# Altium footprint library UCP.PcbLib: 222 footprints (part 8 of 14)
Each footprint in its own frame and in the unit in brackets; x right, y up, seen from the top. Pads: shape width x height; smd on the part's side, far side on the other; paste and mask are expansions set on the pad; w line width, h text height; cw(c..) or ccw(c..) is an arc to the next point about the centre after c.
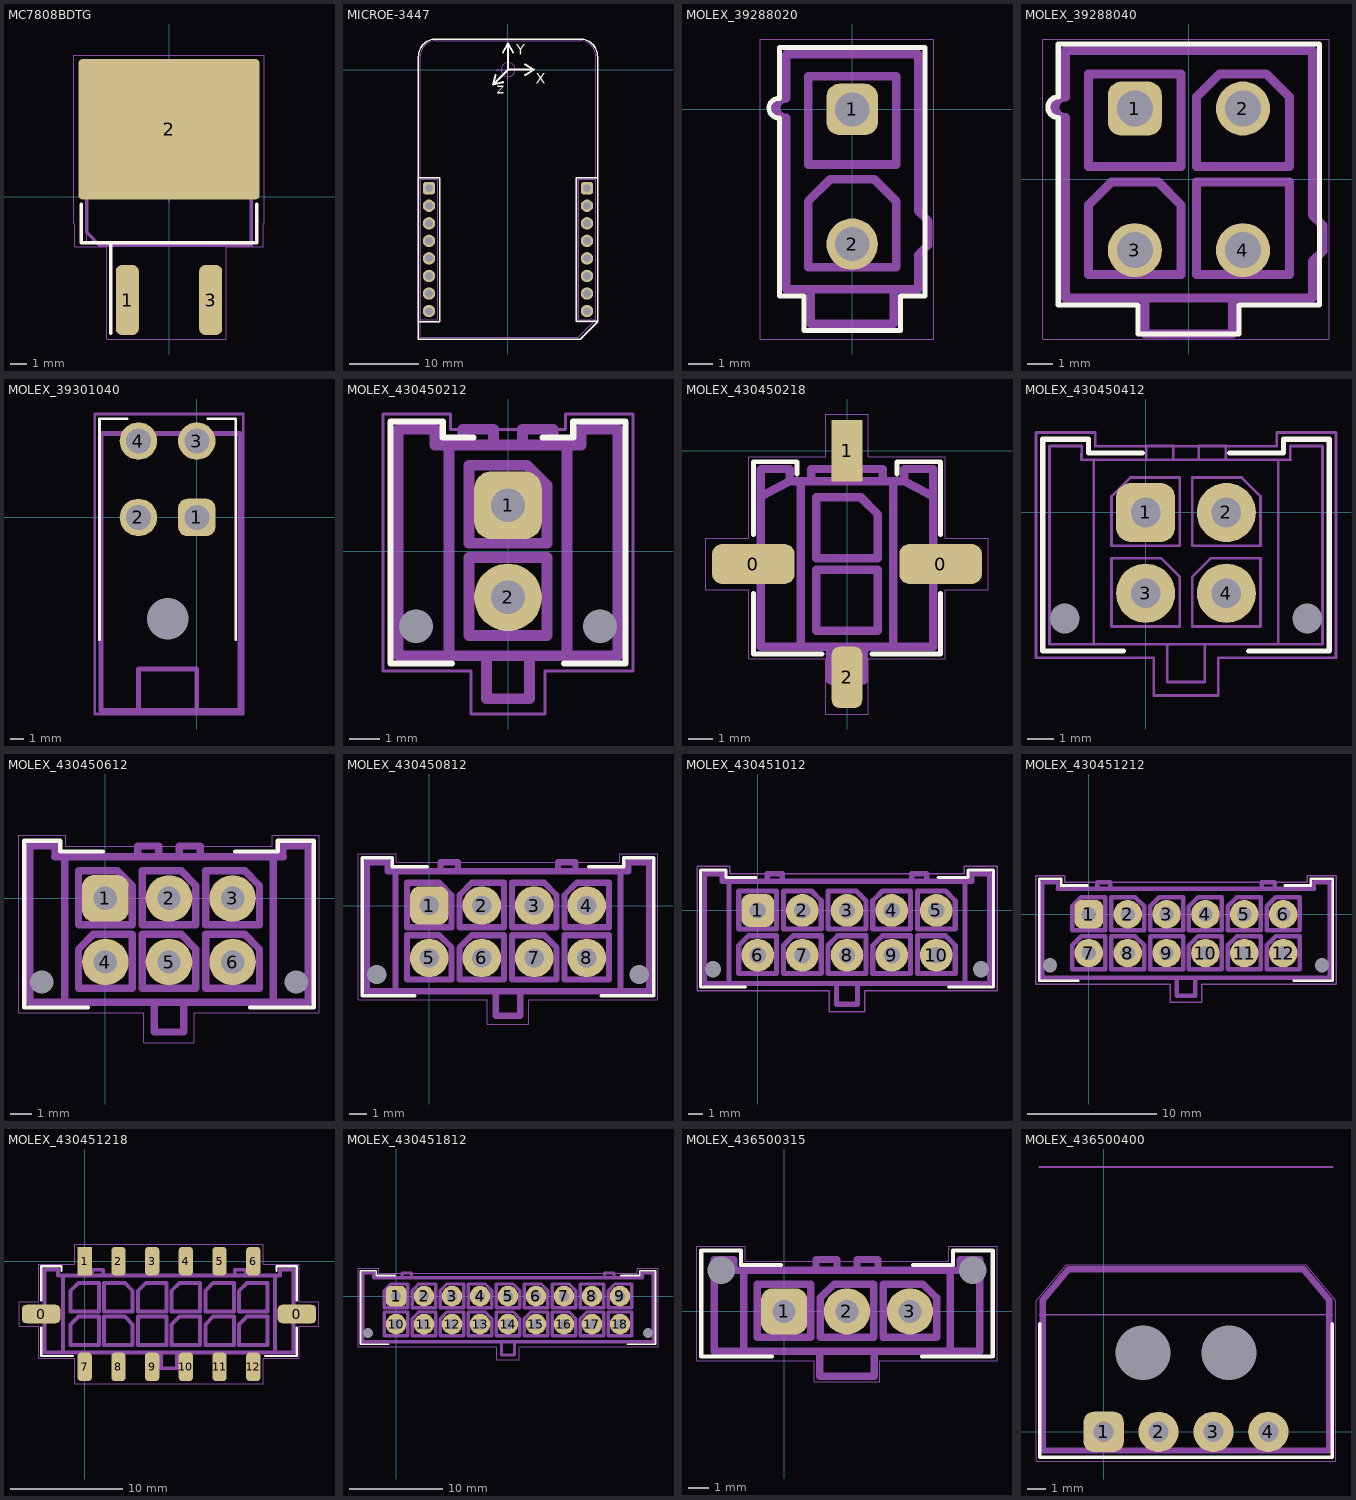
[diagram p7: the footprints below, top view; thin cyan lines are the x and y axes]

## MC7808BDTG [mm] "MC7808BDTG"
pads (3):
  rrect50% 1.4x4.25 smd: 1(-2.54,-6.3) 3(2.54,-6.3)
  rrect5% 11x8.55 smd paste-10.79: 2(0,4.1)
Top Overlay:
  lines w0.2: -5.34,-0.475 -5.34,-2.808 5.34,-2.808 5.34,-0.475 ; -3.54,-8.325 -3.54,-2.81
Top Paste:
  region: -4.11,6.537 -4.11,8.047 -5.31,8.047 -5.31,6.537
  region: -2.54,6.537 -2.54,8.047 -3.74,8.047 -3.74,6.537
  region: 3.74,6.537 3.74,8.047 2.54,8.047 2.54,6.537
  region: 5.31,6.537 5.31,8.047 4.11,8.047 4.11,6.537
  region: 0.6,6.537 0.6,8.047 -0.6,8.047 -0.6,6.537
  region: 2.17,6.537 2.17,8.047 0.97,8.047 0.97,6.537
  region: -0.97,6.537 -0.97,8.047 -2.17,8.047 -2.17,6.537
  region: -5.31,1.663 -5.31,0.153 -4.11,0.153 -4.11,1.663
  region: -3.74,1.663 -3.74,0.153 -2.54,0.153 -2.54,1.663
  region: 2.54,1.663 2.54,0.153 3.74,0.153 3.74,1.663
  region: 4.11,1.663 4.11,0.153 5.31,0.153 5.31,1.663
  region: -0.6,1.663 -0.6,0.153 0.6,0.153 0.6,1.663
  region: 0.97,1.663 0.97,0.153 2.17,0.153 2.17,1.663
  region: -2.17,1.663 -2.17,0.153 -0.97,0.153 -0.97,1.663
  region: -4.11,4.409 -4.11,5.919 -5.31,5.919 -5.31,4.409
  region: -2.54,4.409 -2.54,5.919 -3.74,5.919 -3.74,4.409
  region: 3.74,4.409 3.74,5.919 2.54,5.919 2.54,4.409
  region: 5.31,4.409 5.31,5.919 4.11,5.919 4.11,4.409
  region: 0.6,4.409 0.6,5.919 -0.6,5.919 -0.6,4.409
  region: 2.17,4.409 2.17,5.919 0.97,5.919 0.97,4.409
  region: -0.97,4.409 -0.97,5.919 -2.17,5.919 -2.17,4.409
  region: -5.31,3.791 -5.31,2.281 -4.11,2.281 -4.11,3.791
  region: -3.74,3.791 -3.74,2.281 -2.54,2.281 -2.54,3.791
  region: 2.54,3.791 2.54,2.281 3.74,2.281 3.74,3.791
  region: 4.11,3.791 4.11,2.281 5.31,2.281 5.31,3.791
  region: -0.6,3.791 -0.6,2.281 0.6,2.281 0.6,3.791
  region: 0.97,3.791 0.97,2.281 2.17,2.281 2.17,3.791
  region: -2.17,3.791 -2.17,2.281 -0.97,2.281 -0.97,3.791
Top Designator:
  text ".Designator" at 0,0 h1.5
Top Assembly:
  lines w0.2: -5.017,-2.175 -4.207,-2.985 5.017,-2.985 5.017,7.62 -5.017,7.62 -5.017,-2.175
Top Courtyard:
  lines w0.05: -0.35,0 0.35,0 ; 0,-0.35 0,0.35 ; -5.795,-1.66 -5.795,8.625 5.795,8.625 5.795,-1.66 5.74,-1.66 5.74,-3.058 3.49,-3.058 3.49,-8.675 -3.79,-8.675 -3.79,-3.058 -5.74,-3.058 -5.74,-1.66 -5.795,-1.66
Top Component Outline:
  lines w0.025: -5.017,-2.731 -5.017,6.414 5.017,6.414 5.017,-2.731 -5.017,-2.731
Top Component Terminal:
  lines w0.025: -5.335,0.027 5.335,0.027 5.335,7.65 -5.335,7.65 -5.335,0.027 ; -3.035,-7.62 -3.035,-5.16 -2.045,-5.16 -2.045,-7.62 -3.035,-7.62 ; 2.045,-7.62 2.045,-5.16 3.035,-5.16 3.035,-7.62 2.045,-7.62
3D body "TO-263.stp": height 4.84, standoff 0, extent -5.017,-7.621 5.017,7.619

## MICROE-3447 [mm]
pads (16):
  rrect50% 1.8x1.8 hole 1.1: P1.1(-11.43,-17.146) P2.1(11.43,-17.146)
  round 1.8 hole 1.1: P1.2(-11.43,-19.686) P1.3(-11.43,-22.226) P1.4(-11.43,-24.766) P1.5(-11.43,-27.306) P1.6(-11.43,-29.846) P1.7(-11.43,-32.386) P1.8(-11.43,-34.926) P2.2(11.43,-19.686) P2.3(11.43,-22.226) P2.4(11.43,-24.766) P2.5(11.43,-27.306) P2.6(11.43,-29.846) P2.7(11.43,-32.386) P2.8(11.43,-34.926)
Top Overlay:
  lines w0.2: -12.954,-36.45 -9.906,-36.45 -9.906,-15.646 -12.954,-15.646 ; -12.954,1.9 -12.954,-38.966 10.438,-38.966 12.95,-36.454 12.95,-35.884 12.95,1.904 ccw(c10.414,1.904) 10.414,4.44 -10.414,4.44 ccw(c-10.414,1.904) -12.95,1.904 ; 12.954,-36.45 12.954,-36.426 9.906,-36.426 9.906,-15.646 12.954,-15.646
  lines w0.3: -1.82,-0.759 -2.173,-2.173 ; -0.759,-1.82 -2.173,-2.173 ; -0.75,2.5 0,3.75 ; 0.75,2.5 0,3.75 ; 2.5,-0.75 3.75,0 ; 2.5,0.75 3.75,0 ; -2.173,-2.173 0,0 ; 0,0 3.75,0 ; 0,0 0,3.75
  text "Y" at 1.204,2.154 h1.52
  text "X" at 4.004,-2.044 h1.52
  text "z" at -1.646,-3.446 h1.52
Assembly Notes:
  lines w0.05: -12.954,-36.45 -12.954,-15.622 -9.906,-15.622 -9.906,-36.45 ; -12.954,-36.446 -9.93,-36.446 ; 9.906,-36.45 9.906,-15.622 12.954,-15.622 12.954,-36.45 ; 9.906,-36.446 12.93,-36.446
Top Designator:
  text ".Designator" at -4.511,-0.453 h2
Top Courtyard:
  circle w0.025: c0,0 r1
  lines w0.025: -12.68,-36.196 -12.68,-15.876 ; -1.702,0 1.702,0 ; 0,-1.702 0,1.702 ; 12.68,-36.196 12.68,-15.876 ; -12.7,-38.736 10.16,-38.736 12.7,-36.196 12.7,1.904 ccw(c10.414,1.904) 10.414,4.19 -10.414,4.19 ccw(c-10.414,1.904) -12.7,1.904 -12.7,-38.736
Bottom 3D Body:
  lines w0.1: -12.7,-36.196 -10.16,-36.196 -10.16,-15.876 -12.7,-15.876 -12.7,-36.196 ; 10.16,-36.196 12.7,-36.196 12.7,-15.876 10.16,-15.876 10.16,-36.196
Top Component Outline:
  lines w0.025: -12.68,-36.196 -10.18,-36.196 -10.18,-15.876 -12.68,-15.876 -12.68,-36.196 ; 10.18,-36.196 12.68,-36.196 12.68,-15.876 10.18,-15.876 10.18,-36.196
Top Component Terminal:
  lines w0.025: -11.75,-35.246 -11.75,-34.606 -11.11,-34.606 -11.11,-35.246 -11.75,-35.246 ; -11.75,-32.706 -11.75,-32.066 -11.11,-32.066 -11.11,-32.706 -11.75,-32.706 ; -11.75,-30.166 -11.75,-29.526 -11.11,-29.526 -11.11,-30.166 -11.75,-30.166 ; -11.75,-27.626 -11.75,-26.986 -11.11,-26.986 -11.11,-27.626 -11.75,-27.626 ; -11.75,-25.086 -11.75,-24.446 -11.11,-24.446 -11.11,-25.086 -11.75,-25.086 ; -11.75,-22.546 -11.75,-21.906 -11.11,-21.906 -11.11,-22.546 -11.75,-22.546 ; -11.75,-20.006 -11.75,-19.366 -11.11,-19.366 -11.11,-20.006 -11.75,-20.006 ; -11.75,-17.466 -11.75,-16.826 -11.11,-16.826 -11.11,-17.466 -11.75,-17.466 ; 11.11,-35.246 11.11,-34.606 11.75,-34.606 11.75,-35.246 11.11,-35.246 ; 11.11,-32.706 11.11,-32.066 11.75,-32.066 11.75,-32.706 11.11,-32.706 ; 11.11,-30.166 11.11,-29.526 11.75,-29.526 11.75,-30.166 11.11,-30.166 ; 11.11,-27.626 11.11,-26.986 11.75,-26.986 11.75,-27.626 11.11,-27.626 ; 11.11,-25.086 11.11,-24.446 11.75,-24.446 11.75,-25.086 11.11,-25.086 ; 11.11,-22.546 11.11,-21.906 11.75,-21.906 11.75,-22.546 11.11,-22.546 ; 11.11,-20.006 11.11,-19.366 11.75,-19.366 11.75,-20.006 11.11,-20.006 ; 11.11,-17.466 11.11,-16.826 11.75,-16.826 11.75,-17.466 11.11,-17.466
3D body "MICROE-3447.stp": height 14, standoff -3, extent -12.7,-38.736 12.7,4.19

## MOLEX_39288020 [mm] "Header, Vertical Receptacle, 4.20 mm row X 5.50 mm column pitch; 1.19 mm lead width, 2 pins, 2 rows, 1 pin per row, 5.40 mm L X 9.60 mm W X 13.05 mm H body"
height 12.8
pads (2):
  rrect50% 2.1x2.1 hole 1.4: 1(0,0)
  round 2.1 hole 1.4: 2(0,-5.5)
Top Overlay:
  lines w0.2: -2.975,-7.625 -2.975,-0.35 cw(c-3,0.05) -2.975,0.45 -2.975,2.525 2.975,2.525 2.975,-7.625 1.975,-7.625 1.975,-9.025 -1.975,-9.025 -1.975,-7.625 -2.975,-7.625
Top Assembly:
  lines w0.35: -1.7,-7.35 -1.7,-8.75 1.7,-8.75 1.7,-7.35 ; -1.7,-7.35 -2.7,-7.35 -2.7,-0.35 cw(c-2.7,0.05) -2.7,0.45 -2.7,2.25 2.7,2.25 2.7,-4.14 3.1,-4.54 3.1,-5.54 2.7,-5.94 2.7,-7.35 1.7,-7.35 ; -1.7,-7.35 1.7,-7.35 ; -1.8,-6.45 -1.8,-3.75 -0.9,-2.85 0.9,-2.85 1.8,-3.75 1.8,-6.45 -1.8,-6.45 ; -1.8,-2.25 1.8,-2.25 1.8,1.35 -1.8,1.35 -1.8,-2.25
Top Courtyard:
  lines w0.05: -3.751,-9.375 -3.751,2.875 3.325,2.875 3.325,-9.375 -3.751,-9.375
Top Component Outline:
  lines w0.05: -2.7,-7.35 -2.7,-0.35 cw(c-2.7,0.05) -2.7,0.45 -2.7,2.25 2.7,2.25 2.7,-4.14 3.1,-4.54 3.1,-5.54 2.7,-5.94 2.7,-7.35 1.7,-7.35 -1.7,-7.35 -2.7,-7.35
Top Component Terminal:
  lines w0.025: -0.57,-5.8 0.57,-5.8 0.57,-5.2 -0.57,-5.2 -0.57,-5.8 ; -0.57,-0.3 0.57,-0.3 0.57,0.3 -0.57,0.3 -0.57,-0.3
3D body "MOLEX_39288020.stp": height 12.8, standoff -3.5, extent -3.1,-8.75 3.1,2.25

## MOLEX_39288040 [mm] "Header, Vertical Receptacle, 4.20 mm row X 5.50 mm column pitch; 1.19 mm lead width, 4 pins, 2 rows, 2 pins per row, 9.80 mm L X 9.60 mm W X 13.05 mm H body"
height 13.1
pads (4):
  rrect50% 2.1x2.1 hole 1.4: 1(-2.1,2.75)
  round 2.1 hole 1.4: 2(2.1,2.75) 3(-2.1,-2.75) 4(2.1,-2.75)
Top Overlay:
  lines w0.2: -5.075,2.398 cw(c-5.075,2.799) -5.075,3.2 -5.075,5.25 5.075,5.25 5.075,-4.875 1.95,-4.875 1.95,-6 -1.975,-6 -1.975,-4.875 -5.075,-4.875 -5.075,2.4
Top Assembly:
  lines w0.35: -1.7,-4.6 -4.8,-4.6 -4.8,2.4 cw(c-4.8,2.8) -4.8,3.2 -4.8,5 4.8,5 4.8,-1.39 5.2,-1.79 5.2,-2.79 4.8,-3.19 4.8,-4.6 1.7,-4.6 ; -1.7,-4.6 -1.7,-6 1.7,-6 1.7,-4.6 ; -1.7,-4.6 1.7,-4.6 ; -3.9,-3.7 -3.9,-1 -3,-0.1 -1.2,-0.1 -0.3,-1 -0.3,-3.7 -3.9,-3.7 ; -3.9,0.5 -3.9,4.1 -0.3,4.1 -0.3,0.5 -3.9,0.5 ; 0.3,-3.7 3.9,-3.7 3.9,-0.1 0.3,-0.1 0.3,-3.7 ; 0.3,0.5 3.9,0.5 3.9,3.2 3,4.1 1.2,4.1 0.3,3.2 0.3,0.5
Top Courtyard:
  lines w0.025: -5.675,-6.2 5.45,-6.2 5.45,5.45 -5.675,5.45 -5.675,-6.2
Top Component Outline:
  lines w0.025: -4.8,-4.6 4.8,-4.6 4.8,-3.19 5.2,-2.79 5.2,-1.79 4.8,-1.39 4.8,5 -4.8,5 -4.8,3.2 ccw(c-4.8,2.8) -4.8,2.4 -4.8,-4.6
Top Component Terminal:
  lines w0.025: -2.67,-3.05 -1.53,-3.05 -1.53,-2.45 -2.67,-2.45 -2.67,-3.05 ; -2.67,2.45 -1.53,2.45 -1.53,3.05 -2.67,3.05 -2.67,2.45 ; 1.53,-3.05 2.67,-3.05 2.67,-2.45 1.53,-2.45 1.53,-3.05 ; 1.53,2.45 2.67,2.45 2.67,3.05 1.53,3.05 1.53,2.45
3D body "MOLEX_39281040.stp": height 12.8, standoff -3.5, extent -5.2,-6 5.2,5

## MOLEX_39301040 [mm]
pads (5):
  rrect50% 2.7x2.7 hole 1.8: 1(0,0)
  round 2.7 hole 1.8: 2(-4.2,0) 3(0,5.5) 4(-4.2,5.5)
  round 0 hole 3 unplated mask+0.25: MT1(-2.1,-7.3)
Top Overlay:
  lines w0.2: -7,-8.8 -7,7.1 -5,7.1 ; 0.8,7.1 2.8,7.1 2.8,-8.8
Top Assembly:
  lines w0.35: -4.2,-13.9 -4.2,-10.9 0,-10.9 0,-13.9 ; -6.9,-13.9 -6.9,6.035 3.1,6.035 3.1,-13.9 -6.9,-13.9
Top Courtyard:
  lines w0.2: -7.35,-14.15 3.35,-14.15 3.35,7.45 -7.35,7.45 -7.35,-14.15
Top Component Outline:
  lines w0.025: -6.9,-13.889 3.1,-13.9 3.1,6.035 -6.9,6.035 -6.9,-13.889
Top Component Terminal:
  lines w0.025: -4.735,-0.535 -3.665,-0.535 -3.665,0.535 -4.735,0.535 -4.735,-0.535 ; -4.735,4.965 -3.665,4.965 -3.665,6.035 -4.735,6.035 -4.735,4.965 ; -0.535,-0.535 0.535,-0.535 0.535,0.535 -0.535,0.535 -0.535,-0.535 ; -0.535,4.965 0.535,4.965 0.535,6.035 -0.535,6.035 -0.535,4.965
3D body "MOLEX_039301040.stp": height 11.4, standoff -3.6, extent -6.9,-13.9 3.1,6.035

## MOLEX_430450212 [mm]
height 9.91
pads (4):
  round 0 hole 1.1 unplated mask+0.1: 0(-3,-2.44) 0(3,-2.44)
  rrect50% 2.2x2.2 hole 1.1: 1(0,1.5)
  round 2.2 hole 1.1: 2(0,-1.5)
Top Overlay:
  lines w0.2: -1.825,-3.65 -3.825,-3.65 -3.825,4.22 -2.125,4.22 -2.125,3.71 -1.125,3.71 ; 1.125,3.71 2.125,3.71 2.125,4.22 3.825,4.22 3.825,-3.65 1.825,-3.65
Top Assembly:
  lines w0.35: -2.384,3.46 -1.925,3.46 ; -2.375,3.46 -2.375,3.97 -3.575,3.97 -3.575,2.979 -3.575,1.13 -3.575,0.605 -3.575,-0.545 -3.575,-1.07 -3.575,-3.4 -3.325,-3.4 -1.925,-3.4 ; -1.475,3.46 -1.475,3.97 -0.475,3.97 -0.475,3.46 ; -0.7,-3.4 -0.7,-4.8 0.7,-4.8 0.7,-3.4 ; 0.475,3.46 0.475,3.97 1.475,3.97 1.475,3.46 ; 2.375,3.46 2.375,3.97 3.575,3.97 3.575,2.979 3.575,1.13 3.575,0.605 3.575,-0.545 3.575,-1.07 3.575,-3.4 3.325,-3.4 1.925,-3.4 ; 2.384,3.46 1.925,3.46 ; -1.925,-3.4 1.925,-3.4 ; -1.925,-3.4 -1.925,-2.62 -1.925,2.48 -1.925,3.46 ; -1.925,3.46 1.925,3.46 ; 1.925,-3.4 1.925,-2.62 1.925,2.48 1.925,3.46 ; -1.27,-2.74 1.27,-2.74 1.27,-0.2 -1.27,-0.2 -1.27,-2.74 ; -1.27,0.26 1.27,0.26 1.27,2.15 0.62,2.8 -1.27,2.8 -1.27,0.26
Top Courtyard:
  lines w0.1: -4.075,-3.9 -4.075,4.47 -1.875,4.47 -1.875,3.96 1.875,3.96 1.875,4.47 4.075,4.47 4.075,-3.9 1.2,-3.9 1.2,-5.3 -1.2,-5.3 -1.2,-3.9 -4.075,-3.9
Top Component Outline:
  lines w0.05: -3.575,-3.4 -3.575,3.97 -2.375,3.97 -2.384,3.46 -1.475,3.46 -1.475,3.97 -0.475,3.97 -0.475,3.46 0.475,3.46 0.475,3.97 1.475,3.97 1.475,3.46 2.375,3.46 2.375,3.97 3.575,3.97 3.575,-3.4 0.7,-3.4 0.7,-4.8 -0.7,-4.8 -0.7,-3.4 -3.575,-3.4
Top Component Terminal:
  lines w0.025: -0.32,-1.82 0.32,-1.82 0.32,-1.18 -0.32,-1.18 -0.32,-1.82 ; -0.32,1.18 0.32,1.18 0.32,1.82 -0.32,1.82 -0.32,1.18
3D body "MOLEX_430450212.stp": height 9.91, standoff -3.18, extent -3.575,-4.8 3.575,3.97

## MOLEX_430450218 [mm]
height 9.91
pads (4):
  rrect50% 3.43x1.65 smd: 0(-3.885,-4.7) 0(3.885,-4.7)
  rect 1.27x2.54 smd: 1(0,0)
  rrect50% 1.27x2.54 smd: 2(0,-9.4)
Top Overlay:
  lines w0.2: -3.875,-5.925 -3.875,-8.43 -1.035,-8.43 ; -3.875,-3.475 -3.875,-0.46 -2.075,-0.46 -2.075,-0.97 ; 1.035,-8.43 3.875,-8.43 3.875,-5.925 ; 2.075,-0.97 2.075,-0.46 3.875,-0.46 3.875,-3.475
Top Assembly:
  lines w0.1: -3.575,-5.335 -5.325,-5.335 -5.325,-4.065 -3.575,-4.065 ; -0.32,-9.53 -0.32,-9.97 -0.32,-10.29 0.32,-10.29 0.32,-9.97 0.32,-9.53 ; -0.32,-1.27 -0.32,-0.47 -0.32,0.59 -0.32,0.91 0.32,0.91 0.32,0.59 0.32,-0.47 0.32,-1.27 ; 3.575,-5.335 5.325,-5.335 5.325,-4.065 3.575,-4.065
  lines w0.35: -1.475,-1.27 -1.475,-0.76 -0.475,-0.76 -0.475,-1.27 ; -0.7,-8.13 -0.7,-9.53 0.7,-9.53 0.7,-8.13 ; 0.475,-1.27 0.475,-0.76 1.475,-0.76 1.475,-1.27 ; -3.575,-1.902 -3.575,-0.76 -2.375,-0.76 -2.375,-1.27 ; -3.575,-1.902 -3.325,-1.77 -2.375,-1.27 ; -3.575,-1.902 -3.575,-3.6 -3.575,-4.125 -3.575,-5.275 -3.575,-5.8 -3.575,-8.13 -3.325,-8.13 -1.925,-8.13 ; -2.375,-1.27 -1.925,-1.27 ; -1.925,-8.13 -1.925,-7.38 -1.925,-2.29 -1.925,-1.27 ; -1.925,-8.13 1.925,-8.13 ; -1.925,-1.27 1.925,-1.27 ; 1.925,-8.13 1.925,-7.38 1.925,-2.29 1.925,-1.27 ; 1.925,-8.13 3.325,-8.13 3.575,-8.13 3.575,-5.8 3.575,-5.275 3.575,-4.125 3.575,-3.6 3.575,-1.902 ; 1.925,-1.27 2.375,-1.27 ; 2.375,-1.27 2.375,-0.76 3.575,-0.76 3.575,-1.902 ; 2.375,-1.27 3.325,-1.77 3.575,-1.902 ; -1.27,-7.47 1.27,-7.47 1.27,-4.93 -1.27,-4.93 -1.27,-7.47 ; -1.27,-4.47 -1.27,-1.93 0.57,-1.93 1.27,-2.63 1.27,-4.47 -1.27,-4.47
Top Courtyard:
  lines w0.05: -5.85,-5.775 -5.85,-3.625 -4.075,-3.625 -4.075,-0.26 -0.885,-0.26 -0.885,1.52 0.885,1.52 0.885,-0.26 4.075,-0.26 4.075,-3.625 5.85,-3.625 5.85,-5.775 4.075,-5.775 4.075,-8.63 0.885,-8.63 0.885,-10.92 -0.885,-10.92 -0.885,-8.63 -4.075,-8.63 -4.075,-5.775 -5.85,-5.775
Top Component Outline:
  lines w0.05: -3.575,-8.13 -3.575,-0.76 -2.375,-0.76 -2.375,-1.27 -1.475,-1.27 -1.475,-0.76 -0.475,-0.76 -0.475,-1.27 0.475,-1.27 0.475,-0.76 1.475,-0.76 1.475,-1.27 2.375,-1.27 2.375,-0.76 3.575,-0.76 3.575,-8.13 3.325,-8.13 1.925,-8.13 -1.925,-8.13 -3.325,-8.13 -3.575,-8.13
Top Component Terminal:
  lines w0.025: -5.325,-5.335 -5.325,-4.065 -2.325,-4.065 -2.325,-5.335 -5.325,-5.335 ; -0.32,-10.29 0.32,-10.29 0.32,-9.97 0.32,-8.675 -0.32,-8.675 -0.32,-9.97 -0.32,-10.29 ; -0.32,-0.47 -0.32,0.59 -0.32,0.91 0.32,0.91 0.32,0.59 0.32,-0.47 -0.32,-0.47 ; 2.325,-5.335 5.325,-5.335 5.325,-4.065 2.325,-4.065 2.325,-5.335
3D body "MOLEX_430450218.stp": height 9.91, standoff -0.05, extent -5.325,-10.29 5.325,0.91

## MOLEX_430450412 [mm]
height 9.91
pads (6):
  round 0 hole 1.1 unplated mask+0.1: 0(-3,-3.94) 0(6,-3.94)
  rrect50% 2.2x2.2 hole 1.1: 1(0,0)
  round 2.2 hole 1.1: 2(3,0) 3(0,-3) 4(3,-3)
Top Overlay:
  lines w0.2: -0.825,-5.15 -3.825,-5.15 -3.825,2.72 -2.125,2.72 -2.125,2.21 -0.125,2.21 ; 3.125,2.21 5.125,2.21 5.125,2.72 6.825,2.72 6.825,-5.15 3.825,-5.15
Top Assembly:
  lines w0.1: -2.384,1.96 -1.925,1.96 ; -2.375,1.96 -2.375,2.47 -3.575,2.47 -3.575,1.479 -3.575,-0.37 -3.575,-0.895 -3.575,-2.045 -3.575,-2.57 -3.575,-4.9 -3.325,-4.9 -1.925,-4.9 ; 0.025,1.96 0.025,2.47 1.025,2.47 1.025,1.96 ; 0.8,-4.9 0.8,-6.3 2.2,-6.3 2.2,-4.9 ; 1.975,1.96 1.975,2.47 2.975,2.47 2.975,1.96 ; 5.375,1.96 5.375,2.47 6.575,2.47 6.575,1.479 6.575,-0.37 6.575,-0.895 6.575,-2.045 6.575,-2.57 6.575,-4.9 6.325,-4.9 4.925,-4.9 ; 5.384,1.96 4.925,1.96 ; -1.925,-4.9 4.925,-4.9 ; -1.925,-4.9 -1.925,-4.12 -1.925,0.98 -1.925,1.96 ; -1.925,1.96 4.925,1.96 ; 4.925,-4.9 4.925,-4.12 4.925,0.98 4.925,1.96 ; -1.27,-4.24 -1.27,-1.7 0.57,-1.7 1.27,-2.4 1.27,-4.24 -1.27,-4.24 ; -1.27,-1.24 -1.27,0.6 -0.57,1.3 1.27,1.3 1.27,-1.24 -1.27,-1.24 ; 1.73,-4.24 1.73,-2.4 2.43,-1.7 4.27,-1.7 4.27,-4.24 1.73,-4.24 ; 1.73,-1.24 4.27,-1.24 4.27,0.6 3.57,1.3 1.73,1.3 1.73,-1.24
Top Courtyard:
  lines w0.1: -4.075,-5.4 0.3,-5.4 0.3,-6.8 2.7,-6.8 2.7,-5.4 7.075,-5.4 7.075,2.97 4.875,2.97 4.875,2.46 -1.875,2.46 -1.875,2.97 -4.075,2.97 -4.075,-5.4
Top Component Outline:
  lines w0.1: -3.575,-4.9 -3.575,2.47 -2.375,2.47 -2.384,1.96 0.025,1.96 0.025,2.47 1.025,2.47 1.025,1.96 1.975,1.96 1.975,2.47 2.975,2.47 2.975,1.96 5.375,1.96 5.375,2.47 6.575,2.47 6.575,-4.9 2.2,-4.9 2.2,-6.3 0.8,-6.3 0.8,-4.9 -3.575,-4.9
Top Component Terminal:
  lines w0.1: -0.32,-3.32 0.32,-3.32 0.32,-2.68 -0.32,-2.68 -0.32,-3.32 ; -0.32,-0.32 0.32,-0.32 0.32,0.32 -0.32,0.32 -0.32,-0.32 ; 2.68,-3.32 2.68,-2.68 3.32,-2.68 3.32,-3.32 2.68,-3.32 ; 2.68,-0.32 2.68,0.32 3.32,0.32 3.32,-0.32 2.68,-0.32
3D body "MOLEX_430450412.stp": height 9.91, standoff -3.18, extent -3.575,-6.3 6.575,2.47

## MOLEX_430450612 [mm]
height 9.91
pads (8):
  round 0 hole 1.1 unplated mask+0.1: 0(-3,-3.94) 0(9,-3.94)
  rrect50% 2.2x2.2 hole 1.1: 1(0,0)
  round 2.2 hole 1.1: 2(3,0) 3(6,0) 4(0,-3) 5(3,-3) 6(6,-3)
Top Overlay:
  lines w0.2: -0.825,-5.15 -3.825,-5.15 -3.825,2.72 -2.125,2.72 -2.125,2.21 -0.125,2.21 ; 6.125,2.21 8.125,2.21 8.125,2.72 9.825,2.72 9.825,-5.15 6.825,-5.15
Top Assembly:
  lines w0.35: -2.384,1.96 -1.925,1.96 ; -2.375,1.96 -2.375,2.47 -3.575,2.47 -3.575,1.479 -3.575,-0.37 -3.575,-0.895 -3.575,-2.045 -3.575,-2.57 -3.575,-4.9 -3.325,-4.9 -1.925,-4.9 ; 1.525,1.96 1.525,2.47 2.525,2.47 2.525,1.96 ; 2.3,-4.9 2.3,-6.3 3.7,-6.3 3.7,-4.9 ; 3.475,1.96 3.475,2.47 4.475,2.47 4.475,1.96 ; 8.375,1.96 8.375,2.47 9.575,2.47 9.575,1.479 9.575,-0.37 9.575,-0.895 9.575,-2.045 9.575,-2.57 9.575,-4.9 9.325,-4.9 7.925,-4.9 ; 8.384,1.96 7.925,1.96 ; -1.925,-4.9 -1.925,-4.12 -1.925,0.98 -1.925,1.96 ; -1.925,-4.9 7.925,-4.9 ; -1.925,1.96 7.925,1.96 ; 7.925,-4.9 7.925,-4.12 7.925,0.98 7.925,1.96 ; -1.27,-4.24 -1.27,-2.4 -0.57,-1.7 1.27,-1.7 1.27,-4.24 -1.27,-4.24 ; -1.27,-1.24 -1.27,1.3 0.57,1.3 1.27,0.6 1.27,-1.24 -1.27,-1.24 ; 1.73,-4.24 4.27,-4.24 4.27,-2.4 3.57,-1.7 1.73,-1.7 1.73,-4.24 ; 1.73,-1.24 1.73,1.3 3.57,1.3 4.27,0.6 4.27,-1.24 1.73,-1.24 ; 4.73,-4.24 4.73,-1.7 6.57,-1.7 7.27,-2.4 7.27,-4.24 4.73,-4.24 ; 4.73,-1.24 7.27,-1.24 7.27,0.6 6.57,1.3 4.73,1.3 4.73,-1.24
Top Courtyard:
  lines w0.05: -4.075,-5.4 -4.075,2.97 -1.875,2.97 -1.875,2.46 7.875,2.46 7.875,2.97 10.075,2.97 10.075,-5.4 4.2,-5.4 4.2,-6.8 1.8,-6.8 1.8,-5.4 -4.075,-5.4
Top Component Outline:
  lines w0.05: -3.575,-4.9 -3.575,2.47 -2.375,2.47 -2.375,1.96 8.375,1.96 8.375,2.47 9.575,2.47 9.575,-4.9 3.7,-4.9 3.7,-6.3 2.3,-6.3 2.3,-4.9 -3.575,-4.9
Top Component Terminal:
  lines w0.025: -0.32,-3.32 0.32,-3.32 0.32,-2.68 -0.32,-2.68 -0.32,-3.32 ; -0.32,-0.32 -0.32,0.32 0.32,0.32 0.32,-0.32 -0.32,-0.32 ; 2.68,-3.32 2.68,-2.68 3.32,-2.68 3.32,-3.32 2.68,-3.32 ; 2.68,-0.32 3.32,-0.32 3.32,0.32 2.68,0.32 2.68,-0.32 ; 5.68,-3.32 5.68,-2.68 6.32,-2.68 6.32,-3.32 5.68,-3.32 ; 5.68,-0.32 5.68,0.32 6.32,0.32 6.32,-0.32 5.68,-0.32
3D body "MOLEX_430450612.stp": height 9.91, standoff -3.18, extent -3.575,-6.3 9.575,2.47

## MOLEX_430450812 [mm]
height 9.91
pads (10):
  round 0 hole 1.1 unplated mask+0.1: 0(-3,-3.94) 0(12,-3.94)
  rrect50% 2.2x2.2 hole 1.1: 1(0,0)
  round 2.2 hole 1.1: 2(3,0) 3(6,0) 4(9,0) 5(0,-3) 6(3,-3) 7(6,-3) 8(9,-3)
Top Overlay:
  lines w0.2: -0.825,-5.15 -3.825,-5.15 -3.825,2.72 -2.125,2.72 -2.125,2.21 -0.125,2.21 ; 9.125,2.21 11.125,2.21 11.125,2.72 12.825,2.72 12.825,-5.15 9.825,-5.15
Top Assembly:
  lines w0.35: -2.384,1.96 -1.925,1.96 ; -2.375,1.96 -2.375,2.47 -3.575,2.47 -3.575,-4.9 -3.325,-4.9 -1.925,-4.9 ; 0.65,1.96 0.65,2.47 1.65,2.47 1.65,1.96 ; 3.8,-4.9 3.8,-6.3 5.2,-6.3 5.2,-4.9 ; 7.35,1.96 7.35,2.47 8.35,2.47 8.35,1.96 ; 11.375,1.96 11.375,2.47 12.575,2.47 12.575,-4.9 12.325,-4.9 10.925,-4.9 ; 11.384,1.96 10.925,1.96 ; -1.925,-4.9 10.925,-4.9 ; -1.925,-4.9 -1.925,-4.12 -1.925,0.98 -1.925,1.96 ; -1.925,1.96 10.925,1.96 ; 10.925,-4.9 10.925,-4.12 10.925,0.98 10.925,1.96 ; -1.27,-4.24 1.27,-4.24 1.27,-2.4 0.57,-1.7 -1.27,-1.7 -1.27,-4.24 ; -1.27,-1.24 1.27,-1.24 1.27,0.6 0.57,1.3 -1.27,1.3 -1.27,-1.24 ; 1.73,-4.24 1.73,-2.4 2.43,-1.7 4.27,-1.7 4.27,-4.24 1.73,-4.24 ; 1.73,-1.24 1.73,0.6 2.43,1.3 4.27,1.3 4.27,-1.24 1.73,-1.24 ; 4.73,-4.24 7.27,-4.24 7.27,-2.4 6.57,-1.7 4.73,-1.7 4.73,-4.24 ; 4.73,-1.24 7.27,-1.24 7.27,0.6 6.57,1.3 4.73,1.3 4.73,-1.24 ; 7.73,-4.24 7.73,-1.7 10.27,-1.7 10.27,-4.24 7.73,-4.24 ; 7.73,-1.24 7.73,0.6 8.43,1.3 10.27,1.3 10.27,-1.24 7.73,-1.24
Top Courtyard:
  lines w0.05: -4.075,-5.4 3.3,-5.4 3.3,-6.8 5.7,-6.8 5.7,-5.4 13.075,-5.4 13.075,2.97 10.875,2.97 10.875,2.46 -1.875,2.46 -1.875,2.97 -4.075,2.97 -4.075,-5.4
Top Component Outline:
  lines w0.05: -3.575,-4.9 -3.575,2.47 -2.375,2.47 -2.375,1.96 0.65,1.96 0.65,2.47 1.65,2.47 1.65,1.96 7.35,1.96 7.35,2.47 8.35,2.47 8.35,1.96 11.375,1.96 11.375,2.47 12.575,2.47 12.575,-4.9 5.2,-4.9 5.2,-6.3 3.8,-6.3 3.8,-4.9 -3.575,-4.9
Top Component Terminal:
  lines w0.025: -0.32,-3.32 0.32,-3.32 0.32,-2.68 -0.32,-2.68 -0.32,-3.32 ; -0.32,-0.32 0.32,-0.32 0.32,0.32 -0.32,0.32 -0.32,-0.32 ; 2.68,-3.32 3.32,-3.32 3.32,-2.68 2.68,-2.68 2.68,-3.32 ; 2.68,-0.32 3.32,-0.32 3.32,0.32 2.68,0.32 2.68,-0.32 ; 5.68,-3.32 6.32,-3.32 6.32,-2.68 5.68,-2.68 5.68,-3.32 ; 5.68,-0.32 6.32,-0.32 6.32,0.32 5.68,0.32 5.68,-0.32 ; 8.68,-3.32 9.32,-3.32 9.32,-2.68 8.68,-2.68 8.68,-3.32 ; 8.68,-0.32 9.32,-0.32 9.32,0.32 8.68,0.32 8.68,-0.32
3D body "MOLEX_430450812.stp": height 9.91, standoff -3.18, extent -3.575,-6.3 12.575,2.47

## MOLEX_430451012 [mm]
height 9.91
pads (12):
  round 0 hole 1.1 unplated mask+0.1: 0(-3,-3.94) 0(15,-3.94)
  rrect50% 2.2x2.2 hole 1.1: 1(0,0)
  round 2.2 hole 1.1: 2(3,0) 3(6,0) 4(9,0) 5(12,0) 6(0,-3) 7(3,-3) 8(6,-3) 9(9,-3) 10(12,-3)
Top Overlay:
  lines w0.2: -0.825,-5.15 -3.825,-5.15 -3.825,2.72 -2.125,2.72 -2.125,2.21 -0.125,2.21 ; 12.125,2.21 14.125,2.21 14.125,2.72 15.825,2.72 15.825,-5.15 12.825,-5.15
Top Assembly:
  lines w0.35: -2.384,1.96 -1.925,1.96 ; -2.375,1.96 -2.375,2.47 -3.575,2.47 -3.575,-4.9 -3.325,-4.9 -1.925,-4.9 ; 0.65,1.96 0.65,2.47 1.65,2.47 1.65,1.96 ; 5.3,-4.9 5.3,-6.3 6.7,-6.3 6.7,-4.9 ; 10.35,1.96 10.35,2.47 11.35,2.47 11.35,1.96 ; 14.375,1.96 14.375,2.47 15.575,2.47 15.575,-4.9 15.325,-4.9 13.925,-4.9 ; 14.384,1.96 13.925,1.96 ; -1.925,-4.9 13.925,-4.9 ; -1.925,-4.9 -1.925,-4.12 -1.925,0.98 -1.925,1.96 ; -1.925,1.96 13.925,1.96 ; 13.925,-4.9 13.925,-4.12 13.925,0.98 13.925,1.96 ; -1.27,-4.24 1.27,-4.24 1.27,-1.7 -0.62,-1.7 -1.27,-2.35 -1.27,-4.24 ; -1.27,-1.24 1.27,-1.24 1.27,1.3 -1.27,1.3 -1.27,-1.24 ; 1.73,-4.24 1.73,-2.35 2.38,-1.7 4.27,-1.7 4.27,-4.24 1.73,-4.24 ; 1.73,-1.24 4.27,-1.24 4.27,0.65 3.62,1.3 1.73,1.3 1.73,-1.24 ; 4.73,-4.24 4.73,-2.35 5.38,-1.7 7.27,-1.7 7.27,-4.24 4.73,-4.24 ; 4.73,-1.24 7.27,-1.24 7.27,0.65 6.62,1.3 4.73,1.3 4.73,-1.24 ; 7.73,-4.24 7.73,-2.35 8.38,-1.7 10.27,-1.7 10.27,-4.24 7.73,-4.24 ; 7.73,-1.24 10.27,-1.24 10.27,1.3 8.38,1.3 7.73,0.65 7.73,-1.24 ; 10.73,-4.24 13.27,-4.24 13.27,-2.35 12.62,-1.7 10.73,-1.7 10.73,-4.24 ; 10.73,-1.24 13.27,-1.24 13.27,0.65 12.62,1.3 10.73,1.3 10.73,-1.24
Top Courtyard:
  lines w0.1: -4.075,-5.4 4.8,-5.4 4.8,-6.8 7.2,-6.8 7.2,-5.4 16.075,-5.4 16.075,2.97 13.875,2.97 13.875,2.46 -1.875,2.46 -1.875,2.97 -4.075,2.97 -4.075,-5.4
Top Component Outline:
  lines w0.1: -2.384,1.96 -1.925,1.96 0.65,1.96 0.65,2.47 1.65,2.47 1.65,1.96 10.35,1.96 10.35,2.47 11.35,2.47 11.35,1.96 13.925,1.96 14.384,1.96 ; -2.375,1.96 -2.375,2.47 -3.575,2.47 -3.575,-4.9 -3.325,-4.9 -1.925,-4.9 5.3,-4.9 5.3,-6.3 6.7,-6.3 6.7,-4.9 13.925,-4.9 15.325,-4.9 15.575,-4.9 15.575,2.47 14.375,2.47 14.375,1.96
Top Component Terminal:
  lines w0.1: -0.32,-3.32 0.32,-3.32 0.32,-2.68 -0.32,-2.68 -0.32,-3.32 ; -0.32,-0.32 0.32,-0.32 0.32,0.32 -0.32,0.32 -0.32,-0.32 ; 2.68,-3.32 2.68,-2.68 3.32,-2.68 3.32,-3.32 2.68,-3.32 ; 2.68,-0.32 3.32,-0.32 3.32,0.32 2.68,0.32 2.68,-0.32 ; 5.68,-3.32 6.32,-3.32 6.32,-2.68 5.68,-2.68 5.68,-3.32 ; 5.68,-0.32 5.68,0.32 6.32,0.32 6.32,-0.32 5.68,-0.32 ; 8.68,-3.32 8.68,-2.68 9.32,-2.68 9.32,-3.32 8.68,-3.32 ; 8.68,-0.32 9.32,-0.32 9.32,0.32 8.68,0.32 8.68,-0.32 ; 11.68,-3.32 11.68,-2.68 12.32,-2.68 12.32,-3.32 11.68,-3.32 ; 11.68,-0.32 12.32,-0.32 12.32,0.32 11.68,0.32 11.68,-0.32
3D body "RHDRV10W64P300_1915X877H991.stp": height 9.91, standoff -3.18, extent -3.575,-6.3 15.575,2.47

## MOLEX_430451212 [mm]
height 9.91
pads (14):
  round 0 hole 1.1 unplated mask+0.1: 0(-3,-3.94) 0(18,-3.94)
  rrect50% 2.2x2.2 hole 1.1: 1(0,0)
  round 2.2 hole 1.1: 2(3,0) 3(6,0) 4(9,0) 5(12,0) 6(15,0) 7(0,-3) 8(3,-3) 9(6,-3) 10(9,-3) 11(12,-3) 12(15,-3)
Top Overlay:
  lines w0.2: -0.825,-5.15 -3.825,-5.15 -3.825,2.72 -2.125,2.72 -2.125,2.21 -0.125,2.21 ; 15.125,2.21 17.125,2.21 17.125,2.72 18.825,2.72 18.825,-5.15 15.825,-5.15
Top Assembly:
  lines w0.35: -2.384,1.96 -1.925,1.96 16.925,1.96 17.384,1.96 ; -2.375,1.96 -2.375,2.47 -3.575,2.47 -3.575,-4.9 -3.325,-4.9 -1.925,-4.9 16.925,-4.9 18.325,-4.9 18.575,-4.9 18.575,2.47 17.375,2.47 17.375,1.96 ; 0.65,1.96 0.65,2.47 1.65,2.47 1.65,1.96 ; 6.8,-4.9 6.8,-6.3 8.2,-6.3 8.2,-4.9 ; 13.35,1.96 13.35,2.47 14.35,2.47 14.35,1.96 ; -1.27,-4.24 -1.27,-2.4 -0.57,-1.7 1.27,-1.7 1.27,-4.24 -1.27,-4.24 ; -1.27,-1.24 -1.27,0.6 -0.57,1.3 1.27,1.3 1.27,-1.24 -1.27,-1.24 ; 1.73,-4.24 1.73,-1.7 3.57,-1.7 4.27,-2.4 4.27,-4.24 1.73,-4.24 ; 1.73,-1.24 1.73,1.3 3.57,1.3 4.27,0.6 4.27,-1.24 1.73,-1.24 ; 4.73,-4.24 7.27,-4.24 7.27,-1.7 4.73,-1.7 4.73,-4.24 ; 4.73,-1.24 7.27,-1.24 7.27,1.3 5.43,1.3 4.73,0.6 4.73,-1.24 ; 7.73,-4.24 7.73,-2.4 8.43,-1.7 10.27,-1.7 10.27,-4.24 7.73,-4.24 ; 7.73,-1.24 10.27,-1.24 10.27,1.3 8.43,1.3 7.73,0.6 7.73,-1.24 ; 10.73,-4.24 13.27,-4.24 13.27,-1.7 11.43,-1.7 10.73,-2.4 10.73,-4.24 ; 10.73,-1.24 10.73,0.6 11.43,1.3 13.27,1.3 13.27,-1.24 10.73,-1.24 ; 13.73,-4.24 16.27,-4.24 16.27,-1.7 14.43,-1.7 13.73,-2.4 13.73,-4.24 ; 13.73,-1.24 16.27,-1.24 16.27,1.3 14.43,1.3 13.73,0.6 13.73,-1.24
Top Courtyard:
  lines w0.1: -4.075,-5.4 -4.075,2.97 -1.875,2.97 -1.875,2.46 16.875,2.46 16.875,2.97 19.075,2.97 19.075,-5.4 8.7,-5.4 8.7,-6.8 6.3,-6.8 6.3,-5.4 -4.075,-5.4
Top Component Outline:
  lines w0.1: -2.384,1.96 -1.925,1.96 0.65,1.96 0.65,2.47 1.65,2.47 1.65,1.96 13.35,1.96 13.35,2.47 14.35,2.47 14.35,1.96 16.925,1.96 17.384,1.96 ; -2.375,1.96 -2.375,2.47 -3.575,2.47 -3.575,-4.9 -3.325,-4.9 -1.925,-4.9 6.8,-4.9 6.8,-6.3 8.2,-6.3 8.2,-4.9 18.575,-4.9 18.575,2.47 17.375,2.47 17.375,1.96
Top Component Terminal:
  lines w0.1: -0.32,-3.32 -0.32,-2.68 0.32,-2.68 0.32,-3.32 -0.32,-3.32 ; -0.32,-0.32 -0.32,0.32 0.32,0.32 0.32,-0.32 -0.32,-0.32 ; 2.68,-3.32 3.32,-3.32 3.32,-2.68 2.68,-2.68 2.68,-3.32 ; 2.68,-0.32 2.68,0.32 3.32,0.32 3.32,-0.32 2.68,-0.32 ; 5.68,-3.32 5.68,-2.68 6.32,-2.68 6.32,-3.32 5.68,-3.32 ; 5.68,-0.32 6.32,-0.32 6.32,0.32 5.68,0.32 5.68,-0.32 ; 8.68,-3.32 9.32,-3.32 9.32,-2.68 8.68,-2.68 8.68,-3.32 ; 8.68,-0.32 8.68,0.32 9.32,0.32 9.32,-0.32 8.68,-0.32 ; 11.68,-3.32 12.32,-3.32 12.32,-2.68 11.68,-2.68 11.68,-3.32 ; 11.68,-0.32 11.68,0.32 12.32,0.32 12.32,-0.32 11.68,-0.32 ; 14.68,-3.32 15.32,-3.32 15.32,-2.68 14.68,-2.68 14.68,-3.32 ; 14.68,-0.32 14.68,0.32 15.32,0.32 15.32,-0.32 14.68,-0.32
3D body "MOLEX_430451212.stp": height 9.91, standoff -3.18, extent -3.575,-6.3 18.575,2.47

## MOLEX_430451218 [mm]
height 9.91
pads (14):
  rrect50% 3.43x1.65 smd: 0(-3.885,-4.7) 0(18.885,-4.7)
  rect 1.27x2.54 smd: 1(0,0)
  rrect50% 1.27x2.54 smd: 2(3,0) 3(6,0) 4(9,0) 5(12,0) 6(15,0) 7(0,-9.4) 8(3,-9.4) 9(6,-9.4) 10(9,-9.4) 11(12,-9.4) 12(15,-9.4)
Top Overlay:
  lines w0.2: -3.875,-5.925 -3.875,-8.43 -1.035,-8.43 ; -3.875,-3.475 -3.875,-0.46 -2.075,-0.46 -2.075,-0.87 ; 16.035,-8.43 18.875,-8.43 18.875,-5.925 ; 17.075,-0.87 17.075,-0.46 18.875,-0.46 18.875,-3.475
Top Assembly:
  lines w0.35: -3.575,-5.335 -5.325,-5.335 -5.325,-4.065 -3.575,-4.065 ; -1.925,-8.13 -1.925,-1.27 ; -0.32,-8.11 -0.32,-10.29 0.32,-10.29 0.32,-8.11 ; -0.32,-1.27 -0.32,0.91 0.32,0.91 0.32,-1.27 ; 0.65,-1.27 0.65,-0.76 1.65,-0.76 1.65,-1.27 ; 2.68,-8.11 2.68,-10.29 3.32,-10.29 3.32,-8.11 ; 2.68,-1.27 2.68,0.91 3.32,0.91 3.32,-1.27 ; 5.68,-8.11 5.68,-10.29 6.32,-10.29 6.32,-8.11 ; 5.68,-1.27 5.68,0.91 6.32,0.91 6.32,-1.27 ; 6.8,-8.13 6.8,-9.53 8.2,-9.53 8.2,-8.13 ; 8.68,-8.11 8.68,-10.29 9.32,-10.29 9.32,-8.11 ; 8.68,-1.27 8.68,0.91 9.32,0.91 9.32,-1.27 ; 11.68,-8.11 11.68,-10.29 12.32,-10.29 12.32,-8.11 ; 11.68,-1.27 11.68,0.91 12.32,0.91 12.32,-1.27 ; 13.35,-1.27 13.35,-0.76 14.35,-0.76 14.35,-1.27 ; 14.68,-8.11 14.68,-10.29 15.32,-10.29 15.32,-8.11 ; 14.68,-1.27 14.68,0.91 15.32,0.91 15.32,-1.27 ; 16.925,-8.13 16.925,-1.27 ; 18.575,-5.335 20.325,-5.335 20.325,-4.065 18.575,-4.065 ; -3.575,-8.13 18.575,-8.13 18.575,-0.76 17.375,-0.76 17.375,-1.27 -2.375,-1.27 -2.375,-0.76 -3.575,-0.76 -3.575,-8.13 ; -1.27,-7.47 -1.27,-5.63 -0.57,-4.93 1.27,-4.93 1.27,-7.47 -1.27,-7.47 ; -1.27,-4.47 1.27,-4.47 1.27,-1.93 -0.57,-1.93 -1.27,-2.63 -1.27,-4.47 ; 1.73,-7.47 4.27,-7.47 4.27,-5.63 3.57,-4.93 1.73,-4.93 1.73,-7.47 ; 1.73,-4.47 1.73,-1.93 3.57,-1.93 4.27,-2.63 4.27,-4.47 1.73,-4.47 ; 4.73,-7.47 4.73,-4.93 7.27,-4.93 7.27,-7.47 4.73,-7.47 ; 4.73,-4.47 4.73,-2.63 5.43,-1.93 7.27,-1.93 7.27,-4.47 4.73,-4.47 ; 7.73,-7.47 10.27,-7.47 10.27,-4.93 8.43,-4.93 7.73,-5.63 7.73,-7.47 ; 7.73,-4.47 7.73,-2.63 8.43,-1.93 10.27,-1.93 10.27,-4.47 7.73,-4.47 ; 10.73,-7.47 13.27,-7.47 13.27,-4.93 11.43,-4.93 10.73,-5.63 10.73,-7.47 ; 10.73,-4.47 13.27,-4.47 13.27,-1.93 11.43,-1.93 10.73,-2.63 10.73,-4.47 ; 13.73,-7.47 16.27,-7.47 16.27,-4.93 14.43,-4.93 13.73,-5.63 13.73,-7.47 ; 13.73,-4.47 16.27,-4.47 16.27,-1.93 14.43,-1.93 13.73,-2.63 13.73,-4.47
Top Courtyard:
  lines w0.05: -5.85,-5.775 -5.85,-3.625 -4.075,-3.625 -4.075,-0.26 -0.885,-0.26 -0.885,1.52 15.885,1.52 15.885,-0.26 19.075,-0.26 19.075,-3.625 20.85,-3.625 20.85,-5.775 19.075,-5.775 19.075,-8.63 15.885,-8.63 15.885,-10.92 -0.885,-10.92 -0.885,-8.63 -4.075,-8.63 -4.075,-5.775 -5.85,-5.775
Top Component Outline:
  lines w0.1: -3.575,-8.13 18.575,-8.13 18.575,-0.76 17.375,-0.76 17.375,-1.27 14.35,-1.27 14.35,-0.76 13.35,-0.76 13.35,-1.27 1.65,-1.27 1.65,-0.76 0.65,-0.76 0.65,-1.27 -2.375,-1.27 -2.375,-0.76 -3.575,-0.76 -3.575,-8.13
Top Component Terminal:
  lines w0.025: -5.325,-5.335 -5.325,-4.065 -2.325,-4.065 -2.325,-5.335 -5.325,-5.335 ; -0.32,-10.29 0.32,-10.29 0.32,-8.11 -0.32,-8.11 -0.32,-10.29 ; -0.32,-1.27 -0.32,0.91 0.32,0.91 0.32,-1.27 -0.32,-1.27 ; 2.68,-10.29 3.32,-10.29 3.32,-8.11 2.68,-8.11 2.68,-10.29 ; 2.68,-1.27 2.68,0.91 3.32,0.91 3.32,-1.27 2.68,-1.27 ; 5.68,-10.29 6.32,-10.29 6.32,-8.11 5.68,-8.11 5.68,-10.29 ; 5.68,-1.27 5.68,0.91 6.32,0.91 6.32,-1.27 5.68,-1.27 ; 8.68,-10.29 8.68,-8.11 9.32,-8.11 9.32,-10.29 8.68,-10.29 ; 8.68,-1.27 8.68,0.91 9.32,0.91 9.32,-1.27 8.68,-1.27 ; 11.68,-10.29 12.32,-10.29 12.32,-8.11 11.68,-8.11 11.68,-10.29 ; 11.68,-1.27 11.68,0.91 12.32,0.91 12.32,-1.27 11.68,-1.27 ; 14.68,-10.29 15.32,-10.29 15.32,-8.11 14.68,-8.11 14.68,-10.29 ; 14.68,-1.27 14.68,0.91 15.32,0.91 15.32,-1.27 14.68,-1.27 ; 17.325,-5.355 20.325,-5.355 20.325,-4.085 17.325,-4.085 17.325,-5.355
3D body "MOLEX_430451218.stp": height 9.91, standoff -0.05, extent -5.325,-10.3 20.325,0.9

## MOLEX_430451812 [mm]
height 9.91
pads (20):
  round 0 hole 1.1 unplated mask+0.1: 0(-3,-3.94) 0(27,-3.94)
  rrect50% 2.2x2.2 hole 1.1: 1(0,0)
  round 2.2 hole 1.1: 2(3,0) 3(6,0) 4(9,0) 5(12,0) 6(15,0) 7(18,0) 8(21,0) 9(24,0) 10(0,-3) 11(3,-3) 12(6,-3) 13(9,-3) 14(12,-3) 15(15,-3) 16(18,-3) 17(21,-3) 18(24,-3)
Top Overlay:
  lines w0.2: -0.825,-5.15 -3.825,-5.15 -3.825,2.72 -2.125,2.72 -2.125,2.21 -0.125,2.21 ; 24.125,2.21 26.125,2.21 26.125,2.72 27.825,2.72 27.825,-5.15 24.825,-5.15
Top Assembly:
  lines w0.35: -2.384,1.96 -1.925,1.96 25.925,1.96 26.384,1.96 ; -2.375,1.96 -2.375,2.47 -3.575,2.47 -3.575,-4.9 -3.325,-4.9 -1.925,-4.9 25.925,-4.9 27.325,-4.9 27.575,-4.9 27.575,2.47 26.375,2.47 26.375,1.96 ; 0.65,1.96 0.65,2.47 1.65,2.47 1.65,1.96 ; 11.3,-4.9 11.3,-6.3 12.7,-6.3 12.7,-4.9 ; 22.35,1.96 22.35,2.47 23.35,2.47 23.35,1.96 ; -1.27,-4.24 -1.27,-1.7 1.27,-1.7 1.27,-4.24 -1.27,-4.24 ; -1.27,-1.24 1.27,-1.24 1.27,1.3 -0.57,1.3 -1.27,0.6 -1.27,-1.24 ; 1.73,-4.24 4.27,-4.24 4.27,-1.7 2.43,-1.7 1.73,-2.4 1.73,-4.24 ; 1.73,-1.24 1.73,0.6 2.43,1.3 4.27,1.3 4.27,-1.24 1.73,-1.24 ; 4.73,-4.24 4.73,-2.4 5.43,-1.7 7.27,-1.7 7.27,-4.24 4.73,-4.24 ; 4.73,-1.24 4.73,0.6 5.43,1.3 7.27,1.3 7.27,-1.24 4.73,-1.24 ; 7.73,-4.24 7.73,-1.7 9.57,-1.7 10.27,-2.4 10.27,-4.24 7.73,-4.24 ; 7.73,-1.24 7.73,1.3 9.57,1.3 10.27,0.6 10.27,-1.24 7.73,-1.24 ; 10.73,-4.24 10.73,-1.7 12.57,-1.7 13.27,-2.4 13.27,-4.24 10.73,-4.24 ; 10.73,-1.24 10.73,1.3 12.57,1.3 13.27,0.6 13.27,-1.24 10.73,-1.24 ; 13.73,-4.24 13.73,-2.4 14.43,-1.7 16.27,-1.7 16.27,-4.24 13.73,-4.24 ; 13.73,-1.24 16.27,-1.24 16.27,0.6 15.57,1.3 13.73,1.3 13.73,-1.24 ; 16.73,-4.24 19.27,-4.24 19.27,-2.4 18.57,-1.7 16.73,-1.7 16.73,-4.24 ; 16.73,-1.24 16.73,1.3 18.57,1.3 19.27,0.6 19.27,-1.24 16.73,-1.24 ; 19.73,-4.24 22.27,-4.24 22.27,-1.7 20.43,-1.7 19.73,-2.4 19.73,-4.24 ; 19.73,-1.24 19.73,1.3 22.27,1.3 22.27,-1.24 19.73,-1.24 ; 22.73,-4.24 22.73,-1.7 25.27,-1.7 25.27,-4.24 22.73,-4.24 ; 22.73,-1.24 25.27,-1.24 25.27,1.3 23.43,1.3 22.73,0.6 22.73,-1.24
Top Courtyard:
  lines w0.1: -4.075,-5.4 -4.075,2.97 -1.875,2.97 -1.875,2.46 25.875,2.46 25.875,2.97 28.075,2.97 28.075,-5.4 13.2,-5.4 13.2,-6.8 10.8,-6.8 10.8,-5.4 -4.075,-5.4
Top Component Outline:
  lines w0.1: -2.384,1.96 -1.925,1.96 0.65,1.96 0.65,2.47 1.65,2.47 1.65,1.96 22.35,1.96 22.35,2.47 23.35,2.47 23.35,1.96 25.925,1.96 26.384,1.96 ; -2.375,1.96 -2.375,2.47 -3.575,2.47 -3.575,-4.9 -3.325,-4.9 -1.925,-4.9 11.3,-4.9 11.3,-6.3 12.7,-6.3 12.7,-4.9 27.575,-4.9 27.575,2.47 26.375,2.47 26.375,1.96
Top Component Terminal:
  lines w0.1: -0.32,-3.32 -0.32,-2.68 0.32,-2.68 0.32,-3.32 -0.32,-3.32 ; -0.32,-0.32 -0.32,0.32 0.32,0.32 0.32,-0.32 -0.32,-0.32 ; 2.68,-3.32 3.32,-3.32 3.32,-2.68 2.68,-2.68 2.68,-3.32 ; 2.68,-0.32 2.68,0.32 3.32,0.32 3.32,-0.32 2.68,-0.32 ; 5.68,-3.32 5.68,-2.68 6.32,-2.68 6.32,-3.32 5.68,-3.32 ; 5.68,-0.32 6.32,-0.32 6.32,0.32 5.68,0.32 5.68,-0.32 ; 8.68,-3.32 9.32,-3.32 9.32,-2.68 8.68,-2.68 8.68,-3.32 ; 8.68,-0.32 8.68,0.32 9.32,0.32 9.32,-0.32 8.68,-0.32 ; 11.68,-3.32 12.32,-3.32 12.32,-2.68 11.68,-2.68 11.68,-3.32 ; 11.68,-0.32 11.68,0.32 12.32,0.32 12.32,-0.32 11.68,-0.32 ; 14.68,-3.32 15.32,-3.32 15.32,-2.68 14.68,-2.68 14.68,-3.32 ; 14.68,-0.32 14.68,0.32 15.32,0.32 15.32,-0.32 14.68,-0.32 ; 17.68,-3.32 18.32,-3.32 18.32,-2.68 17.68,-2.68 17.68,-3.32 ; 17.68,-0.32 17.68,0.32 18.32,0.32 18.32,-0.32 17.68,-0.32 ; 20.68,-3.32 21.32,-3.32 21.32,-2.68 20.68,-2.68 20.68,-3.32 ; 20.68,-0.32 20.68,0.32 21.32,0.32 21.32,-0.32 20.68,-0.32 ; 23.68,-3.32 24.32,-3.32 24.32,-2.68 23.68,-2.68 23.68,-3.32 ; 23.68,-0.32 23.68,0.32 24.32,0.32 24.32,-0.32 23.68,-0.32
3D body "MOLEX_430451812.stp": height 9.91, standoff -3.18, extent -3.575,-6.3 27.575,2.47

## MOLEX_436500315 [mm]
height 9.91
pads (5):
  round 0 hole 1.3 unplated mask+0.1: 0(-3,1.96) 0(9,1.96)
  rrect50% 2.2x2.2 hole 1.1: 1(0,0)
  round 2.2 hole 1.1: 2(3,0) 3(6,0)
Top Overlay:
  lines w0.2: -0.575,-2.15 -3.95,-2.15 -3.95,2.9 -2.05,2.9 -2.05,2.21 -0.14,2.21 ; 6.14,2.21 8.05,2.21 8.05,2.9 9.95,2.9 9.95,-2.15 6.575,-2.15
Top Assembly:
  lines w0.35: 1.525,1.96 1.525,2.47 2.525,2.47 2.525,1.96 ; 1.7,-1.9 1.7,-3.1 4.3,-3.1 4.3,-1.9 ; 3.475,1.96 3.475,2.47 4.475,2.47 4.475,1.96 ; -1.925,-1.9 -1.925,-1.26 -1.925,0.81 -1.925,1.96 ; -1.925,-1.9 -3.325,-1.9 -3.325,-1.26 -3.325,0.81 -3.325,1.45 -3.325,2.47 -2.39,2.47 -2.39,1.96 -1.925,1.96 ; -1.925,-1.9 7.925,-1.9 ; -1.925,1.96 7.925,1.96 ; 7.925,-1.9 7.925,-1.26 7.925,0.81 7.925,1.96 ; 7.925,-1.9 9.325,-1.9 9.325,-1.26 9.325,0.81 9.325,1.45 9.325,2.47 8.39,2.47 8.39,1.96 7.925,1.96 ; -1.27,-1.24 -1.27,1.3 1.27,1.3 1.27,-1.24 -1.27,-1.24 ; 1.73,-1.24 4.27,-1.24 4.27,1.3 2.38,1.3 1.73,0.65 1.73,-1.24 ; 4.73,-1.24 4.73,1.3 6.62,1.3 7.27,0.65 7.27,-1.24 4.73,-1.24
Top Courtyard:
  lines w0.05: -4.15,-2.35 1.45,-2.35 1.45,-3.35 4.55,-3.35 4.55,-2.35 10.15,-2.35 10.15,3.1 7.85,3.1 7.85,2.4 -1.85,2.4 -1.85,3.1 -4.15,3.1 -4.15,-2.35
Top Component Outline:
  lines w0.1: -3.325,-1.9 -3.325,-1.26 -3.325,0.81 -3.325,1.45 -3.325,2.47 -2.39,2.47 -2.39,1.96 -1.925,1.96 1.525,1.96 1.525,2.47 2.525,2.47 2.525,1.96 3.475,1.96 3.475,2.47 4.475,2.47 4.475,1.96 7.925,1.96 8.39,1.96 8.39,2.47 9.325,2.47 9.325,1.45 9.325,0.81 9.325,-1.26 9.325,-1.9 7.925,-1.9 4.3,-1.9 4.3,-3.1 1.7,-3.1 1.7,-1.9 -1.925,-1.9 -3.325,-1.9
Top Component Terminal:
  lines w0.1: -3.32,1.5 -2.68,1.5 -2.68,2.4 -3.32,2.4 -3.32,1.5 ; -0.32,-0.32 0.32,-0.32 0.32,0.32 -0.32,0.32 -0.32,-0.32 ; 2.68,-0.32 3.32,-0.32 3.32,0.32 2.68,0.32 2.68,-0.32 ; 5.68,-0.32 6.32,-0.32 6.32,0.32 5.68,0.32 5.68,-0.32 ; 8.68,1.55 9.32,1.55 9.32,2.45 8.68,2.45 8.68,1.55
3D body "MOLEX_436500315.stp": height 9.9, standoff -3.18, extent -3.325,-3.1 9.325,2.47

## MOLEX_436500400 [mm]
height 5
pads (6):
  rrect50% 2.2x2.2 hole 1.1: 1(0,0)
  round 2.2 hole 1.1: 2(3,0) 3(6,0) 4(9,0)
  round 0 hole 3 unplated mask+0.25: MT1(2.15,4.32) MT2(6.85,4.32)
Top Overlay:
  lines w0.2: -3.5,5.9 -3.5,-1.4 12.5,-1.4 12.5,5.9
Dimensions:
  lines w0.1: -3.5,6.4 12.5,6.4 ; -3.5,14.48 12.5,14.48
  text "Min" at 10.41,6.52 h1.6
  text "Max" at 10.41,14.6 h1.6
  text "Bord edge" at 2,14.6 h1.6
  text "Bord edge" at 2,6.52 h1.6
Top Assembly:
  lines w0.35: -3.325,-1.02 12.325,-1.02 12.325,7.212 10.925,8.88 -1.925,8.88 -3.325,7.212 -3.325,-1.02
Top Courtyard:
  lines w0.05: -3.7,-1.6 12.7,-1.6 12.7,7.154 11.041,9.13 -2.041,9.13 -3.7,7.154 -3.7,-1.6
Top Component Outline:
  lines w0.05: -3.325,-1.02 -3.325,7.212 -1.925,8.88 10.925,8.88 12.325,7.212 12.325,-1.02 -3.325,-1.02
Top Component Terminal:
  lines w0.025: -0.32,-0.32 0.32,-0.32 0.32,0.32 -0.32,0.32 -0.32,-0.32 ; 2.68,-0.32 3.32,-0.32 3.32,0.32 2.68,0.32 2.68,-0.32 ; 5.68,-0.32 6.32,-0.32 6.32,0.32 5.68,0.32 5.68,-0.32 ; 8.68,-0.32 9.32,-0.32 9.32,0.32 8.68,0.32 8.68,-0.32
3D body "MOLEX_436500400.stp": height 5.57, standoff -3.3, extent -3.325,-1.02 12.325,8.88